# Altium footprint library leaded.PcbLib: 197 footprints (part 4 of 13)
Each footprint in its own frame and in the unit in brackets; x right, y up, seen from the top. Pads: shape width x height; smd on the part's side, far side on the other; paste and mask are expansions set on the pad; w line width, h text height; cw(c..) or ccw(c..) is an arc to the next point about the centre after c.
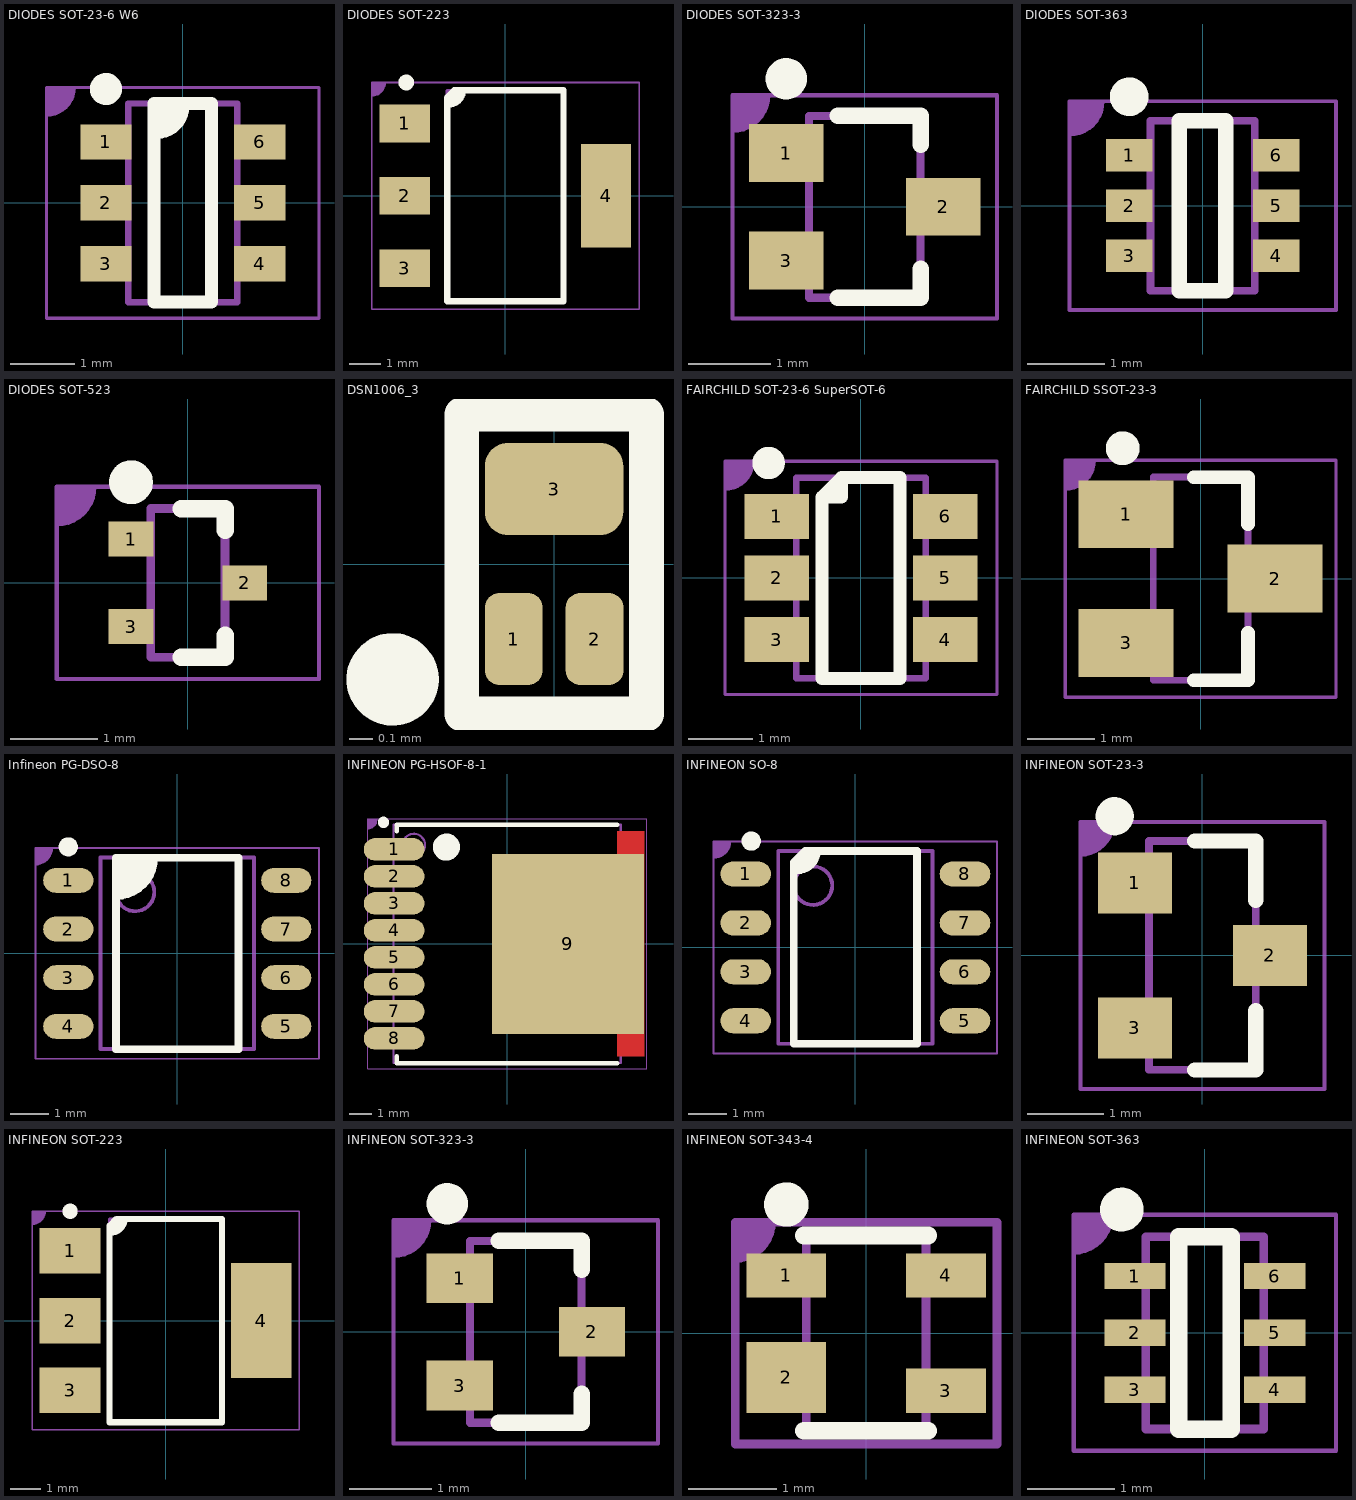
[diagram p3: the footprints below, top view; thin cyan lines are the x and y axes]

## DIODES SOT-23-6 W6 [mm] "SOT23, 6-Leads, Body 3.00x2.85mm, Pitch 0.95mm, IPC Medium Density"
height 1.3
pads (6):
  rect 0.8x0.55 smd: 1(-1.2,0.95) 2(-1.2,0) 3(-1.2,-0.95) 4(1.2,-0.95) 5(1.2,0) 6(1.2,0.95)
Top Overlay:
  circle w0.25: c-1.2,1.775 r0.125
  region: -0.45,1.55 0.1,1.55 0.1,1.5 -0.3,1.1 -0.45,1.1
  lines w0.2: -0.4,1.1 ccw(c-0.4,1.5) 0,1.5 ; -0.45,-1.55 -0.45,1.55 0.45,1.55 0.45,-1.55 -0.45,-1.55
Mechanical 13:
  lines w0.1: -0.85,-1.55 0.85,-1.55 0.85,1.55 -0.85,1.55 -0.85,-1.55
Top Component (Mech14):
  region: -2.125,1.8 -2.125,1.362 -2.042,1.362 -1.991,1.413 -1.908,1.413 -1.73,1.591 -1.73,1.681 -1.694,1.718 -1.694,1.8
  lines w0.05: -2.125,-1.8 2.125,-1.8 2.125,1.8 -2.125,1.8 -2.125,-1.8
  lines w0.051: -2.125,1.369 ccw(c-2.125,1.8) -1.694,1.8
  text ".Designator" at -0.61,-0.406 h1.52
3D body "SOT-23-6.STEP": height 1, standoff 0, extent -1.187,-1.45 1.2,1.45

## DIODES SOT-223 [mm] "SOT223, 4-Leads, Body 6.50x7.00mm (avg), Pitch 2.30mm, IPC Medium Density"
height 1.8
pads (4):
  rect 1.6x1.2 smd: 1(-3.2,2.3) 2(-3.2,0) 3(-3.2,-2.3)
  rect 1.6x3.3 smd: 4(3.2,0)
Top Overlay:
  circle w0.25: c-3.15,3.6 r0.125
  region: -1.65,3.275 -1.35,3.35 -1.35,3.2 -1.65,2.9 -1.85,2.9
  lines w0.2: -1.85,2.9 -1.8,2.9 ccw(c-1.8,3.35) -1.35,3.35 ; -1.85,-3.35 1.85,-3.35 1.85,3.35 -1.625,3.35 -1.85,3.125 -1.85,-3.35
Mechanical 13:
  lines w0.1: -1.85,-3.35 -1.85,3.35 1.85,3.35 1.85,-3.35 -1.85,-3.35
Top Component (Mech14):
  region: -4.25,3.6 -4.25,3.162 -4.167,3.162 -4.116,3.213 -4.033,3.213 -3.855,3.391 -3.855,3.481 -3.819,3.518 -3.819,3.6
  lines w0.05: -4.25,-3.6 -4.25,3.6 4.25,3.6 4.25,-3.6 -4.25,-3.6
  lines w0.051: -4.25,3.169 ccw(c-4.25,3.6) -3.819,3.6
  text ".Designator" at -0.61,-0.406 h1.52
3D body "SOT-223.STEP": height 1.8, standoff 0, extent -3.516,-3.25 3.5,3.25

## DIODES SOT-323-3 [mm] "SOT323, 3-Leads, Body 2.00x2.10mm, Pitch 0.65mm, IPC Medium Density"
height 1
pads (3):
  rect 0.9x0.7 smd: 1(-0.95,0.65) 2(0.95,0) 3(-0.95,-0.65)
Top Overlay:
  circle w0.25: c-0.95,1.55 r0.125
  lines w0.2: -0.325,-1.1 0.675,-1.1 0.675,-0.75 ; -0.325,1.1 0.675,1.1 0.675,0.75
Mechanical 13:
  lines w0.1: -0.675,-1.1 -0.675,1.1 0.675,1.1 0.675,-1.1 -0.675,-1.1
Top Component (Mech14):
  region: -1.6,1.35 -1.6,0.912 -1.517,0.912 -1.466,0.963 -1.383,0.963 -1.205,1.141 -1.205,1.231 -1.169,1.268 -1.169,1.35
  lines w0.05: -1.6,-1.35 -1.6,1.35 1.6,1.35 1.6,-1.35 -1.6,-1.35
  lines w0.051: -1.6,0.919 ccw(c-1.6,1.35) -1.169,1.35
  text ".Designator" at -0.61,-0.406 h1.52
3D body "sot-323.STEP": height 1, standoff 0, extent -1.058,-1 1.059,1

## DIODES SOT-363 [mm] "SOT363, 6-Leads, Body 2.00x2.10mm, Pitch 0.65mm, IPC Medium Density"
height 1.1
pads (6):
  rect 0.6x0.42 smd: 1(-0.95,0.65) 2(-0.95,0) 3(-0.95,-0.65) 4(0.95,-0.65) 5(0.95,0) 6(0.95,0.65)
Top Overlay:
  circle w0.25: c-0.95,1.41 r0.125
  lines w0.2: -0.3,-1.1 0.3,-1.1 0.3,1.1 -0.3,1.1 -0.3,-1.1
Mechanical 13:
  lines w0.1: -0.675,-1.1 -0.675,1.1 0.675,1.1 0.675,-1.1 -0.675,-1.1
Top Component (Mech14):
  region: -1.725,1.35 -1.725,0.912 -1.642,0.912 -1.591,0.963 -1.508,0.963 -1.33,1.141 -1.33,1.231 -1.294,1.268 -1.294,1.35
  lines w0.05: -1.725,-1.35 -1.725,1.35 1.725,1.35 1.725,-1.35 -1.725,-1.35
  lines w0.051: -1.725,0.919 ccw(c-1.725,1.35) -1.294,1.35
  text ".Designator" at -0.61,-0.406 h1.52
3D body "SOT-363.STEP": height 1.05, standoff 0, extent -1.058,-1.1 1.058,1.1

## DIODES SOT-523 [mm] "SOT523, 3-Leads, Body 0.8x1.60mm, Pitch 0.50mm, IPC Medium Density"
height 0.8
pads (3):
  rect 0.51x0.4 smd: 1(-0.65,0.5) 2(0.65,0) 3(-0.65,-0.5)
Top Overlay:
  circle w0.25: c-0.65,1.15 r0.125
  lines w0.2: -0.075,-0.85 0.425,-0.85 0.425,-0.6 ; -0.075,0.85 0.425,0.85 0.425,0.6
Mechanical 13:
  lines w0.1: -0.425,-0.85 -0.425,0.85 0.425,0.85 0.425,-0.85 -0.425,-0.85
Top Component (Mech14):
  region: -1.5,1.1 -1.5,0.662 -1.417,0.662 -1.366,0.713 -1.283,0.713 -1.105,0.891 -1.105,0.981 -1.069,1.018 -1.069,1.1
  lines w0.05: -1.5,-1.1 -1.5,1.1 1.5,1.1 1.5,-1.1 -1.5,-1.1
  lines w0.051: -1.5,0.669 ccw(c-1.5,1.1) -1.069,1.1
  text ".Designator" at -0.61,-0.406 h1.52
3D body "sot-523.STEP": height 0.82, standoff 0, extent -0.808,-0.8 0.809,0.8

## DSN1006_3 [mm] "X2-DSN1006-3, 1X0.6X0.35mm"
height 0.35
pads (3):
  rrect50% 0.25x0.4 smd mask+0.05: 1(-0.175,-0.325) 2(0.175,-0.325)
  rrect50% 0.6x0.4 smd mask+0.05: 3(0,0.325)
Top Overlay:
  circle w0.2: c-0.7,-0.5 r0.1
  lines w0.15: -0.4,-0.65 -0.4,0.65 0.4,0.65 0.4,-0.65 -0.4,-0.65
3D body "User Library-DSN1006-2.step": height 0.47, standoff -0.03, extent -0.3,-0.5 0.3,0.5

## FAIRCHILD SOT-23-6 SuperSOT-6 [mm] "SOT23, 6-Leads, Body 2.9x1.6mm, Pitch 0.95mm, IPC Medium Density"
height 1.1
pads (6):
  rect 1x0.7 smd: 1(-1.3,0.95) 2(-1.3,0) 3(-1.3,-0.95) 4(1.3,-0.95) 5(1.3,0) 6(1.3,0.95)
Top Overlay:
  circle w0.25: c-1.425,1.775 r0.125
  lines w0.2: -0.6,1.25 -0.3,1.25 -0.3,1.55 ; -0.6,1.25 -0.6,-1.55 0.6,-1.55 0.6,1.55 -0.3,1.55 ; -0.6,1.25 -0.3,1.55
Mechanical 13:
  lines w0.1: -1,-1.55 -1,1.55 1,1.55 1,-1.55 -1,-1.55
Top Component (Mech14):
  region: -2.1,1.8 -2.1,1.362 -2.017,1.362 -1.966,1.413 -1.883,1.413 -1.705,1.591 -1.705,1.681 -1.669,1.718 -1.669,1.8
  lines w0.05: -2.1,-1.8 -2.1,1.8 2.1,1.8 2.1,-1.8 -2.1,-1.8
  lines w0.051: -2.1,1.369 ccw(c-2.1,1.8) -1.669,1.8
  text ".Designator" at -0.61,-0.406 h1.52
3D body "sot-23-6-fairchild.STEP": height 1.45, standoff 0, extent -1.46,-1.45 1.461,1.45

## FAIRCHILD SSOT-23-3 [mm] "SOT23, 3-Leads, Body 2.90x2.40mm, Pitch 0.95mm, IPC Medium Density"
height 1.35
pads (3):
  rect 1.4x1 smd: 1(-1.1,0.95) 2(1.1,0) 3(-1.1,-0.95)
Top Overlay:
  circle w0.25: c-1.15,1.925 r0.125
  lines w0.2: -0.1,-1.5 0.7,-1.5 0.7,-0.8 ; -0.1,1.5 0.7,1.5 0.7,0.8
Mechanical 13:
  lines w0.1: -0.7,-1.5 0.7,-1.5 0.7,1.5 -0.7,1.5 -0.7,-1.5
Top Component (Mech14):
  region: -2,1.75 -2,1.312 -1.917,1.312 -1.866,1.363 -1.783,1.363 -1.605,1.541 -1.605,1.631 -1.569,1.668 -1.569,1.75
  lines w0.05: -2,-1.75 -2,1.75 2,1.75 2,-1.75 -2,-1.75
  lines w0.051: -2,1.319 ccw(c-2,1.75) -1.569,1.75
  text ".Designator" at -0.61,-0.406 h1.52
3D body "sot-23-3-fairchild-supersot.STEP": height 1, standoff 0, extent -1.265,-1.46 1.265,1.46

## Infineon PG-DSO-8 [mm]
height 1.75
pads (8):
  oval 1.31x0.65 smd: 1(-2.845,1.905) 2(-2.845,0.635) 3(-2.845,-0.635) 4(-2.845,-1.905) 5(2.845,-1.905) 6(2.845,-0.635) 7(2.845,0.635) 8(2.845,1.905)
Top Overlay:
  circle w0.25: c-2.845,2.78 r0.125
  region: -1.6,2.5 -0.6,2.5 -0.6,2.1 -1.2,1.5 -1.6,1.5
  lines w0.2: -1.6,1.5 ccw(c-1.6,2.5) -0.6,2.5 ; -1.6,-2.5 1.6,-2.5 1.6,2.5 -1.6,2.5 -1.6,-2.5
Mechanical 13:
  circle w0.1: c-1.1,1.6 r0.5
  lines w0.1: -2,-2.5 2,-2.5 2,2.5 -2,2.5 -2,-2.5
Top Component (Mech14):
  region: -3.7,2.75 -3.7,2.312 -3.617,2.312 -3.566,2.363 -3.483,2.363 -3.305,2.541 -3.305,2.631 -3.269,2.668 -3.269,2.75
  lines w0.05: -3.7,-2.75 3.7,-2.75 3.7,2.75 -3.7,2.75 -3.7,-2.75
  lines w0.051: -3.7,2.319 ccw(c-3.7,2.75) -3.269,2.75
  text ".Designator" at -0.61,-0.406 h1.52
3D body "Infineon PG-DSO-8.STEP": height 1.8, standoff 0.01, extent -3.036,-2.45 3.036,2.45

## INFINEON PG-HSOF-8-1 [mm] "PG-HSOF, 9-Leads, Body 10.58x11.68mm, Pitch 1.20mm, IPC Medium Density"
height 2.4
pads (9):
  oval 2.7x1 smd: 1(-5.025,4.2) 2(-5.025,3) 3(-5.025,1.8) 4(-5.025,0.6) 5(-5.025,-0.6) 6(-5.025,-1.8) 7(-5.025,-3) 8(-5.025,-4.2)
  rect 6.75x8 smd: 9(2.7,0)
Top Layer:
  region: 4.9,5 6.1,5 6.1,-5 4.9,-5
Top Overlay:
  circle w0.25: c-5.5,5.4 r0.125
  circle w0.6: c-2.7,4.3 r0.3
  lines w0.2: -4.9,-5 -4.9,-5.3 4.9,-5.3 ; -4.9,5 -4.9,5.3 4.9,5.3
Mechanical 13:
  circle w0.1: c-4.15,4.39 r0.5
  lines w0.1: -5.05,-5.29 -5.05,5.29 5.05,5.29 5.05,-5.29 -5.05,-5.29
Top Component (Mech14):
  region: -6.2,5.55 -6.2,5.112 -6.117,5.112 -6.066,5.163 -5.983,5.163 -5.805,5.341 -5.805,5.431 -5.769,5.468 -5.769,5.55
  lines w0.05: -6.2,-5.55 -6.2,5.55 6.2,5.55 6.2,-5.55 -6.2,-5.55
  lines w0.051: -6.2,5.119 ccw(c-6.2,5.55) -5.769,5.55
  text ".Designator" at -0.61,-0.406 h1.52
3D body "PG-HSOF-8-1.STEP": height 2.3, standoff 0, extent -5.815,-4.95 5.915,4.95

## INFINEON SO-8 [mm] "SOIC, 8-Leads, Body 4.90x3.90mm, Pitch 1.27mm, IPC Medium Density"
height 1.75
pads (8):
  oval 1.31x0.65 smd: 1(-2.845,1.905) 2(-2.845,0.635) 3(-2.845,-0.635) 4(-2.845,-1.905) 5(2.845,-1.905) 6(2.845,-0.635) 7(2.845,0.635) 8(2.845,1.905)
Top Overlay:
  circle w0.25: c-2.7,2.755 r0.125
  region: -1.3,2.5 -1,2.5 -1,2.401 -1.076,2.217 -1.217,2.076 -1.401,2 -1.5,2 -1.6,2 -1.6,2.2
  lines w0.2: -1.6,2 -1.5,2 ccw(c-1.5,2.5) -1,2.5 ; -1.6,-2.5 -1.6,2.2 -1.3,2.5 1.6,2.5 1.6,-2.5 -1.6,-2.5
Mechanical 13:
  circle w0.1: c-1.1,1.6 r0.5
  lines w0.1: -2,-2.5 2,-2.5 2,2.5 -2,2.5 -2,-2.5
Top Component (Mech14):
  region: -3.675,2.75 -3.675,2.312 -3.592,2.312 -3.541,2.363 -3.458,2.363 -3.28,2.541 -3.28,2.631 -3.244,2.668 -3.244,2.75
  lines w0.05: -3.675,-2.75 -3.675,2.75 3.675,2.75 3.675,-2.75 -3.675,-2.75
  lines w0.051: -3.675,2.319 ccw(c-3.675,2.75) -3.244,2.75
  text ".Designator" at -0.61,-0.406 h1.52
3D body "SO-8.STEP": height 1.5, standoff 0, extent -3.014,-2.45 3.014,2.45

## INFINEON SOT-23-3 [mm] "SOT23, 3-Leads, Body 2.90x2.40mm, Pitch 0.95mm, IPC Medium Density"
height 1.35
pads (3):
  rect 0.972x0.802 smd: 1(-0.885,0.95) 2(0.885,0) 3(-0.885,-0.95)
Top Overlay:
  circle w0.25: c-1.15,1.825 r0.125
  lines w0.2: -0.1,-1.5 0.7,-1.5 0.7,-0.725 ; -0.1,1.5 0.7,1.5 0.7,0.725
Mechanical 13:
  lines w0.1: -0.7,-1.5 0.7,-1.5 0.7,1.5 -0.7,1.5 -0.7,-1.5
Top Component (Mech14):
  region: -1.6,1.75 -1.6,1.312 -1.517,1.312 -1.466,1.363 -1.383,1.363 -1.205,1.541 -1.205,1.631 -1.169,1.668 -1.169,1.75
  lines w0.05: -1.6,-1.75 -1.6,1.75 1.6,1.75 1.6,-1.75 -1.6,-1.75
  lines w0.051: -1.6,1.319 ccw(c-1.6,1.75) -1.169,1.75
  text ".Designator" at -0.61,-0.406 h1.52
3D body "sot-23-3-infineon.STEP": height 1, standoff 0, extent -1.16,-1.45 1.16,1.45

## INFINEON SOT-223 [mm] "SOT223, 4-Leads, Body 6.50x7.00mm (avg), Pitch 2.30mm, IPC Medium Density"
height 1.8
pads (4):
  rect 2x1.5 smd: 1(-3.15,2.3) 2(-3.15,0) 3(-3.15,-2.3)
  rect 2x3.8 smd: 4(3.15,0)
Top Overlay:
  circle w0.25: c-3.15,3.6 r0.125
  region: -1.65,3.275 -1.35,3.35 -1.35,3.2 -1.65,2.9 -1.85,2.9
  lines w0.2: -1.85,2.9 -1.8,2.9 ccw(c-1.8,3.35) -1.35,3.35 ; -1.85,-3.35 -1.85,3.125 -1.625,3.35 1.85,3.35 1.85,-3.35 -1.85,-3.35
Mechanical 13:
  lines w0.1: -1.85,-3.35 1.85,-3.35 1.85,3.35 -1.85,3.35 -1.85,-3.35
Top Component (Mech14):
  region: -4.4,3.6 -4.4,3.162 -4.317,3.162 -4.266,3.213 -4.183,3.213 -4.005,3.391 -4.005,3.481 -3.969,3.518 -3.969,3.6
  lines w0.05: -4.4,-3.6 -4.4,3.6 4.4,3.6 4.4,-3.6 -4.4,-3.6
  lines w0.051: -4.4,3.169 ccw(c-4.4,3.6) -3.969,3.6
  text ".Designator" at -0.61,-0.406 h1.52
3D body "SOT-223.STEP": height 1.8, standoff 0, extent -3.516,-3.25 3.5,3.25

## INFINEON SOT-323-3 [mm] "SOT323, 3-Leads, Body 2.00x2.10mm, Pitch 0.65mm, IPC Medium Density"
height 1
pads (3):
  rect 0.8x0.6 smd: 1(-0.8,0.65) 2(0.8,0) 3(-0.8,-0.65)
Top Overlay:
  circle w0.25: c-0.95,1.55 r0.125
  lines w0.2: -0.325,-1.1 0.675,-1.1 0.675,-0.75 ; -0.325,1.1 0.675,1.1 0.675,0.75
Mechanical 13:
  lines w0.1: -0.675,-1.1 0.675,-1.1 0.675,1.1 -0.675,1.1 -0.675,-1.1
Top Component (Mech14):
  region: -1.6,1.35 -1.6,0.912 -1.517,0.912 -1.466,0.963 -1.383,0.963 -1.205,1.141 -1.205,1.231 -1.169,1.268 -1.169,1.35
  lines w0.05: -1.6,-1.35 -1.6,1.35 1.6,1.35 1.6,-1.35 -1.6,-1.35
  lines w0.051: -1.6,0.919 ccw(c-1.6,1.35) -1.169,1.35
  text ".Designator" at -0.61,-0.406 h1.52
3D body "sot-323.STEP": height 1, standoff 0, extent -1.058,-1 1.059,1

## INFINEON SOT-343-4 [mm] "SOT343, 4-Leads, Body 2.3x2.4mm (max), Pitch 1.30mm, IPC High Density"
height 1.2
pads (4):
  rect 0.9x0.5 smd: 1(-0.9,0.65) 3(0.9,-0.65) 4(0.9,0.65)
  rect 0.9x0.8 smd: 2(-0.9,-0.5)
Top Overlay:
  circle w0.25: c-0.9,1.45 r0.125
  lines w0.2: -0.7,-1.1 0.7,-1.1 ; -0.7,1.1 0.7,1.1
Mechanical 13:
  lines w0.1: -0.675,-1.125 0.675,-1.125 0.675,1.125 -0.675,1.125 -0.675,-1.125
Top Component (Mech14):
  region: -1.475,1.25 -1.475,0.812 -1.392,0.812 -1.341,0.863 -1.258,0.863 -1.08,1.041 -1.08,1.131 -1.044,1.168 -1.044,1.25
  lines w0.051: -1.475,0.819 ccw(c-1.475,1.25) -1.044,1.25
  lines w0.1: -1.475,-1.25 -1.475,1.25 1.475,1.25 1.475,-1.25 -1.475,-1.25
  text ".Designator" at -0.61,-0.406 h1.52
3D body "Infineon SOT343-4 rf.STEP": height 1, standoff 0, extent -1.1,-1.1 1.1,1.1

## INFINEON SOT-363 [mm] "SOT363, 6-Leads, Body 2.00x2.10mm, Pitch 0.65mm, IPC Medium Density"
height 1.1
pads (6):
  rect 0.7x0.3 smd: 1(-0.8,0.65) 2(-0.8,0) 3(-0.8,-0.65) 4(0.8,-0.65) 5(0.8,0) 6(0.8,0.65)
Top Overlay:
  circle w0.25: c-0.95,1.41 r0.125
  lines w0.2: -0.3,-1.1 -0.3,1.1 0.3,1.1 0.3,-1.1 -0.3,-1.1
Mechanical 13:
  lines w0.1: -0.675,-1.1 0.675,-1.1 0.675,1.1 -0.675,1.1 -0.675,-1.1
Top Component (Mech14):
  region: -1.5,1.35 -1.5,0.912 -1.417,0.912 -1.366,0.963 -1.283,0.963 -1.105,1.141 -1.105,1.231 -1.069,1.268 -1.069,1.35
  lines w0.05: -1.5,-1.35 -1.5,1.35 1.5,1.35 1.5,-1.35 -1.5,-1.35
  lines w0.051: -1.5,0.919 ccw(c-1.5,1.35) -1.069,1.35
  text ".Designator" at -0.61,-0.406 h1.52
3D body "SOT-363.STEP": height 1.05, standoff 0, extent -1.058,-1.1 1.058,1.1